# Altium integrated library Crystal 32768kHz.IntLib: 1 symbol
Pins are listed as number, name and electrical type; pins without a type are passive.

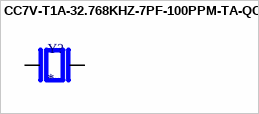
[diagram p0: symbol CC7V-T1A-32.768KHZ-7PF-100PPM-TA-QC]

## CC7V-T1A-32.768KHZ-7PF-100PPM-TA-QC
designator Y?
LOW FREQUENCY CRYSTAL; MP: CC7V-T1A-32.768KHZ-7PF-100PPM-TA-QC; MF: Micro Crystal; Package: SMD-2 Micro Crystal; Check_prices: https://www.snapeda.com/parts/CC7V-T1A-32.768KHZ-7PF-100PPM-TA-QC/Micro+Crystal/view-part/?ref=eda; Digi-Key_Part_Number: 2195-CC7V-T1A-32.768KHZ-7PF-100PPM-TA-QCTR-ND; Purchase-URL: https://pricing.snapeda.com/search/part/CC7V-T1A-32.768KHZ-7PF-100PPM-TA-QC/?ref=eda; Value: *; SnapEDA_Link: https://www.snapeda.com/parts/CC7V-T1A-32.768KHZ-7PF-100PPM-TA-QC/Micro+Crystal/view-part/?ref=snap
footprint XTAL_CC7V-T1A-32.768KHZ-7PF-100PPM-TA-QC
pins: 1, 2